# Altium schematic symbol library Serwomechanizm.SchLib: 1 symbol
Pins are listed as number, name and electrical type; pins without a type are passive.

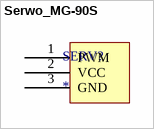
[diagram p0: symbol Serwo_MG-90S]

## Serwo_MG-90S
designator SERV?
footprint Serwo_MG-90S
pins: 1 PWM, 2 VCC, 3 GND